# Altium footprint library JEDEC.PcbLib: 40 footprints (part 2 of 3)
Each footprint in its own frame and in the unit in brackets; x right, y up, seen from the top. Pads: shape width x height; smd on the part's side, far side on the other; paste and mask are expansions set on the pad; w line width, h text height; cw(c..) or ccw(c..) is an arc to the next point about the centre after c.
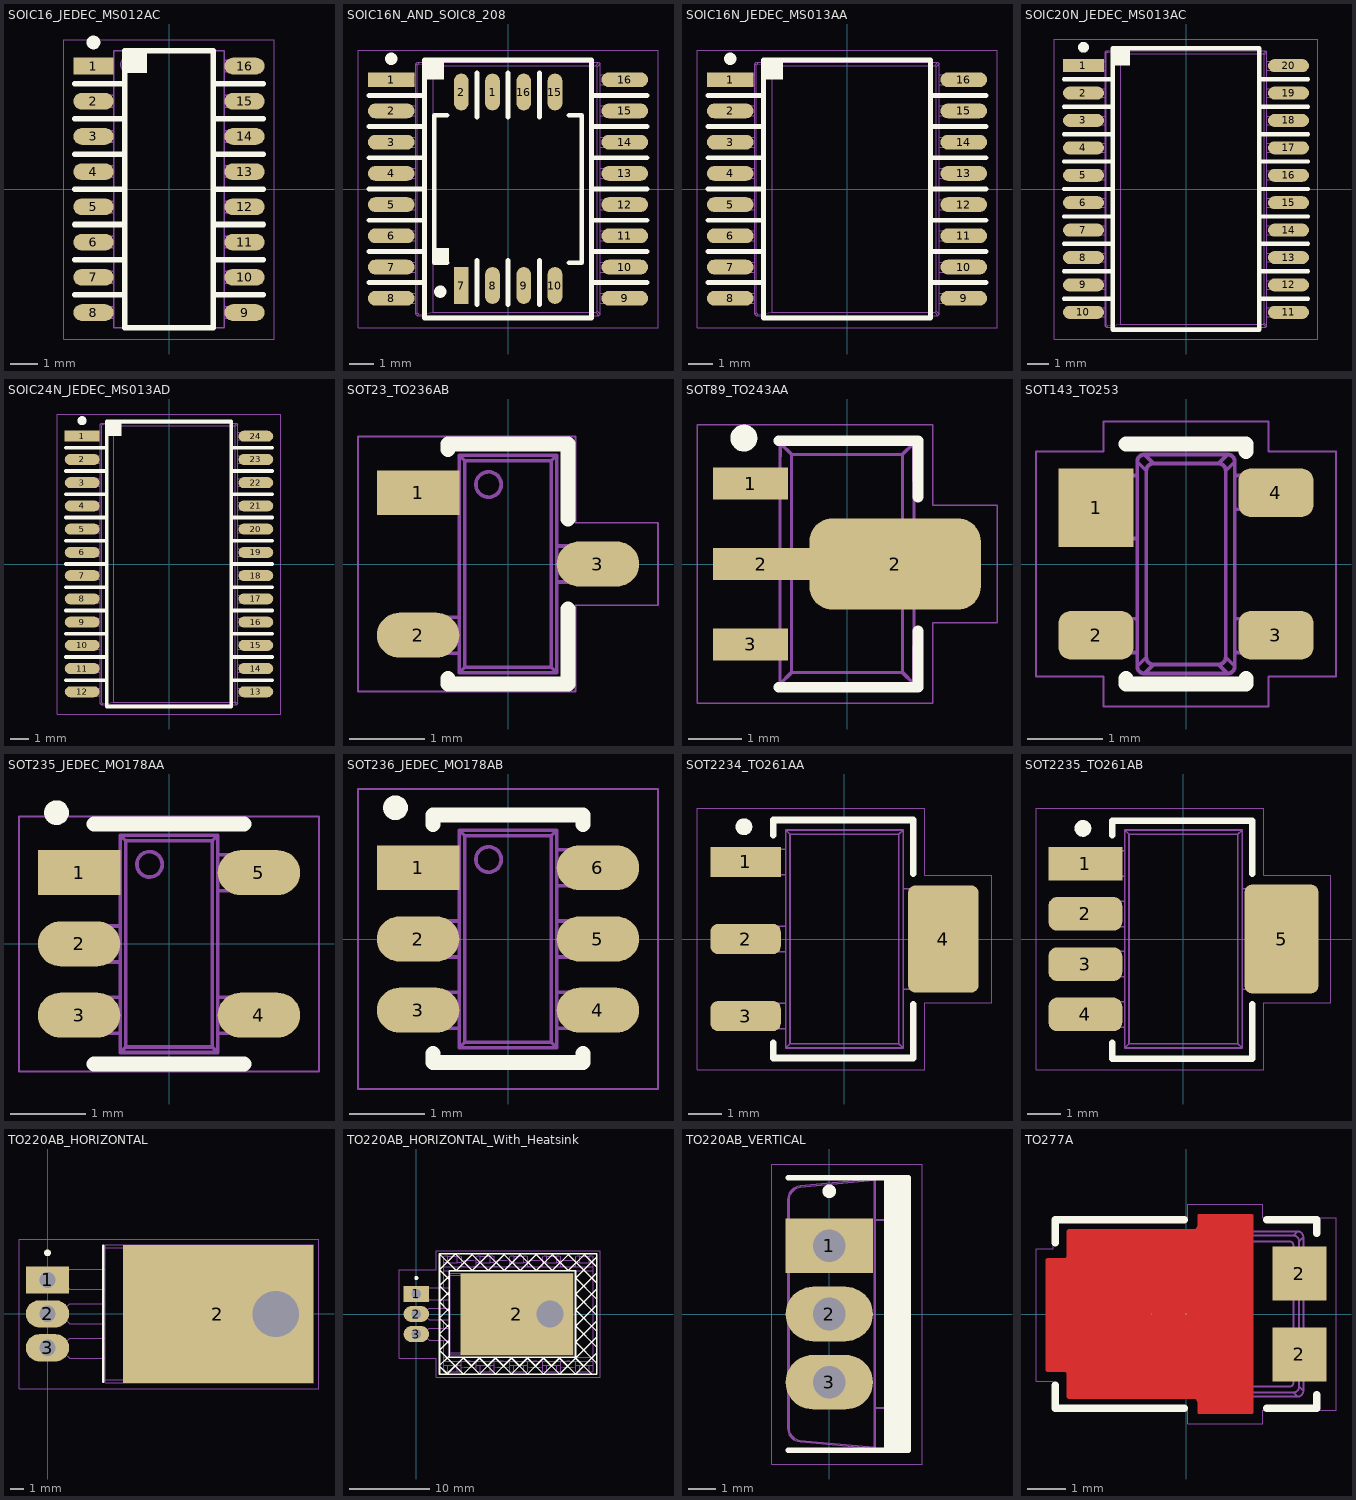
[diagram p1: the footprints below, top view; thin cyan lines are the x and y axes]

## SOIC16_JEDEC_MS012AC [mm] "SOIC, 16-Leads, Body 3.90x9.90mm, Pitch 1.27mm"
height 1.75
pads (16):
  rect 1.45x0.6 smd paste+0 mask+0.05: 1(-2.725,4.445)
  oval 1.45x0.6 smd paste+0 mask+0.05: 2(-2.725,3.175) 3(-2.725,1.905) 4(-2.725,0.635) 5(-2.725,-0.635) 6(-2.725,-1.905) 7(-2.725,-3.175) 8(-2.725,-4.445) 9(2.725,-4.445) 10(2.725,-3.175) 11(2.725,-1.905) 12(2.725,-0.635) 13(2.725,0.635) 14(2.725,1.905) 15(2.725,3.175) 16(2.725,4.445)
Top Overlay:
  circle w0.25: c-2.725,5.295 r0.125
  rectangle: -1.6,4.2 -0.8,5
  lines w0.2: -3.4,-3.81 -1.6,-3.81 ; -3.4,-2.54 -1.6,-2.54 ; -3.4,-1.27 -1.6,-1.27 ; -3.4,0 -1.6,0 ; -3.4,1.27 -1.6,1.27 ; -3.4,2.54 -1.6,2.54 ; -3.4,3.81 -1.6,3.81 ; 1.6,-3.81 3.4,-3.81 ; 1.6,-2.54 3.4,-2.54 ; 1.6,-1.27 3.4,-1.27 ; 1.6,0 3.4,0 ; 1.6,1.27 3.4,1.27 ; 1.6,2.54 3.4,2.54 ; 1.6,3.81 3.4,3.81 ; -1.6,-5 1.6,-5 1.6,5 -1.6,5 -1.6,-5
Top Courtyard:
  lines w0.025: -3.8,-5.4 3.8,-5.4 3.8,5.4 -3.8,5.4 -3.8,-5.4
Top Assembly:
  drawing of 213 lines, arcs and shapes, not listed
  text ".Designator" at 0.453,-4.511 h2
3D body "SOIC16_JEDEC_MS012.x_t": height 1.43, standoff 0, extent -3,-4.95 3,4.95

## SOIC16N_AND_SOIC8_208 [mm] "SOIC16 300mil, 16-Leads, Body 7.5x10.3mm"
height 2.05
pads (24):
  rect 1.9x0.6 smd paste+0 mask+0.05: 1(-4.75,4.445)
  oval 0.6x1.5 smd paste+0 mask+0.05: 1(-0.63,3.943) 2(-1.9,3.943) 8(-0.63,-3.925) 9(0.64,-3.925) 10(1.91,-3.925) 15(1.91,3.943) 16(0.64,3.943)
  oval 1.9x0.6 smd paste+0 mask+0.05: 2(-4.75,3.175) 3(-4.75,1.905) 4(-4.75,0.635) 5(-4.75,-0.635) 6(-4.75,-1.905) 7(-4.75,-3.175) 8(-4.75,-4.445) 9(4.75,-4.445) 10(4.75,-3.175) 11(4.75,-1.905) 12(4.75,-0.635) 13(4.75,0.635) 14(4.75,1.905) 15(4.75,3.175) 16(4.75,4.445)
  rect 0.6x1.5 smd paste+0 mask+0.05: 7(-1.9,-3.925)
Top Overlay:
  circle w0.25: c-2.755,-4.175 r0.125
  circle w0.25: c-4.75,5.295 r0.125
  region: -2.4,-3 -2.4,-2.4 -3,-2.4 -3,-3
  rectangle: -3.4,4.45 -2.6,5.25
  lines w0.2: -5.65,-3.81 -3.4,-3.81 ; -5.65,-2.54 -3.4,-2.54 ; -5.65,-1.27 -3.4,-1.27 ; -5.65,0 -3.4,0 ; -5.65,1.27 -3.4,1.27 ; -5.65,2.54 -3.4,2.54 ; -5.65,3.81 -3.4,3.81 ; -2.475,-3 -3,-3 -3,3 -2.475,3 ; -1.265,-4.7 -1.265,-2.9 ; -1.265,2.918 -1.265,4.718 ; 0.005,-4.7 0.005,-2.9 ; 0.005,2.918 0.005,4.718 ; 1.275,-4.7 1.275,-2.9 ; 1.275,2.918 1.275,4.718 ; 2.475,-3 3,-3 3,3 2.475,3 ; 3.4,-3.81 5.65,-3.81 ; 3.4,-2.54 5.65,-2.54 ; 3.4,-1.27 5.65,-1.27 ; 3.4,0 5.65,0 ; 3.4,1.27 5.65,1.27 ; 3.4,2.54 5.65,2.54 ; 3.4,3.81 5.65,3.81 ; -3.4,-5.25 -3.4,5.25 3.4,5.25 3.4,-5.25 -3.4,-5.25
Top Courtyard:
  lines w0.025: -6.1,-5.65 6.1,-5.65 6.1,5.65 -6.1,5.65 -6.1,-5.65
Top Assembly:
  drawing of 307 lines, arcs and shapes, not listed
  text ".Designator" at 0.679,-6.763 h3
3D body "SOIC16N_JEDEC_MS013AA.x_t": height 2.25, standoff 0, extent -5.15,-5.15 5.15,5.15

## SOIC16N_JEDEC_MS013AA [mm] "SOIC16 300mil, 16-Leads, Body 7.5x10.3mm"
height 2.05
pads (16):
  rect 1.9x0.6 smd paste+0 mask+0.05: 1(-4.75,4.445)
  oval 1.9x0.6 smd paste+0 mask+0.05: 2(-4.75,3.175) 3(-4.75,1.905) 4(-4.75,0.635) 5(-4.75,-0.635) 6(-4.75,-1.905) 7(-4.75,-3.175) 8(-4.75,-4.445) 9(4.75,-4.445) 10(4.75,-3.175) 11(4.75,-1.905) 12(4.75,-0.635) 13(4.75,0.635) 14(4.75,1.905) 15(4.75,3.175) 16(4.75,4.445)
Top Overlay:
  circle w0.25: c-4.75,5.295 r0.125
  rectangle: -3.4,4.45 -2.6,5.25
  lines w0.2: -5.65,-3.81 -3.4,-3.81 ; -5.65,-2.54 -3.4,-2.54 ; -5.65,-1.27 -3.4,-1.27 ; -5.65,0 -3.4,0 ; -5.65,1.27 -3.4,1.27 ; -5.65,2.54 -3.4,2.54 ; -5.65,3.81 -3.4,3.81 ; 3.4,-3.81 5.65,-3.81 ; 3.4,-2.54 5.65,-2.54 ; 3.4,-1.27 5.65,-1.27 ; 3.4,0 5.65,0 ; 3.4,1.27 5.65,1.27 ; 3.4,2.54 5.65,2.54 ; 3.4,3.81 5.65,3.81 ; -3.4,-5.25 -3.4,5.25 3.4,5.25 3.4,-5.25 -3.4,-5.25
Top Courtyard:
  lines w0.025: -6.1,-5.65 -6.1,5.65 6.1,5.65 6.1,-5.65 -6.1,-5.65
Top Assembly:
  drawing of 307 lines, arcs and shapes, not listed
  text ".Designator" at 0.679,-6.763 h3
3D body "SOIC16N_JEDEC_MS013AA.x_t": height 2.25, standoff 0, extent -5.15,-5.15 5.15,5.15

## SOIC20N_JEDEC_MS013AC [mm] "SOIC16 300mil, 16-Leads, Body 7.5x12.8mm"
height 2.05
pads (20):
  rect 1.9x0.6 smd paste+0 mask+0.05: 1(-4.75,5.715)
  oval 1.9x0.6 smd paste+0 mask+0.05: 2(-4.75,4.445) 3(-4.75,3.175) 4(-4.75,1.905) 5(-4.75,0.635) 6(-4.75,-0.635) 7(-4.75,-1.905) 8(-4.75,-3.175) 9(-4.75,-4.445) 10(-4.75,-5.715) 11(4.75,-5.715) 12(4.75,-4.445) 13(4.75,-3.175) 14(4.75,-1.905) 15(4.75,-0.635) 16(4.75,0.635) 17(4.75,1.905) 18(4.75,3.175) 19(4.75,4.445) 20(4.75,5.715)
Top Overlay:
  circle w0.25: c-4.75,6.565 r0.125
  rectangle: -3.4,5.72 -2.6,6.52
  lines w0.2: -5.65,-5.08 -3.4,-5.08 ; -5.65,-3.81 -3.4,-3.81 ; -5.65,-2.54 -3.4,-2.54 ; -5.65,-1.27 -3.4,-1.27 ; -5.65,0 -3.4,0 ; -5.65,1.27 -3.4,1.27 ; -5.65,2.54 -3.4,2.54 ; -5.65,3.81 -3.4,3.81 ; -5.65,5.08 -3.4,5.08 ; 3.4,-5.08 5.65,-5.08 ; 3.4,-3.81 5.65,-3.81 ; 3.4,-2.54 5.65,-2.54 ; 3.4,-1.27 5.65,-1.27 ; 3.4,0 5.65,0 ; 3.4,1.27 5.65,1.27 ; 3.4,2.54 5.65,2.54 ; 3.4,3.81 5.65,3.81 ; 3.4,5.08 5.65,5.08 ; -3.4,-6.52 3.4,-6.52 3.4,6.52 -3.4,6.52 -3.4,-6.52
Top Courtyard:
  lines w0.025: -6.1,-6.95 -6.1,6.95 6.1,6.95 6.1,-6.95 -6.1,-6.95
Top Assembly:
  drawing of 375 lines, arcs and shapes, not listed
  text ".Designator" at 0.679,-6.763 h3
3D body "SOIC20N_JEDEC_MS013AC.x_t": height 2.25, standoff 0, extent -5.15,-6.4 5.15,6.4

## SOIC24N_JEDEC_MS013AD [mm] "SOIC24 300mil, 24-Leads, Body 7.5x15.4mm"
height 2.05
pads (24):
  rect 1.9x0.6 smd paste+0 mask+0.05: 1(-4.75,6.985)
  oval 1.9x0.6 smd paste+0 mask+0.05: 2(-4.75,5.715) 3(-4.75,4.445) 4(-4.75,3.175) 5(-4.75,1.905) 6(-4.75,0.635) 7(-4.75,-0.635) 8(-4.75,-1.905) 9(-4.75,-3.175) 10(-4.75,-4.445) 11(-4.75,-5.715) 12(-4.75,-6.985) 13(4.75,-6.985) 14(4.75,-5.715) 15(4.75,-4.445) 16(4.75,-3.175) 17(4.75,-1.905) 18(4.75,-0.635) 19(4.75,0.635) 20(4.75,1.905) 21(4.75,3.175) 22(4.75,4.445) 23(4.75,5.715) 24(4.75,6.985)
Top Overlay:
  circle w0.25: c-4.75,7.835 r0.125
  rectangle: -3.4,6.99 -2.6,7.79
  lines w0.2: -5.65,-6.35 -3.4,-6.35 ; -5.65,-5.08 -3.4,-5.08 ; -5.65,-3.81 -3.4,-3.81 ; -5.65,-2.54 -3.4,-2.54 ; -5.65,-1.27 -3.4,-1.27 ; -5.65,0 -3.4,0 ; -5.65,1.27 -3.4,1.27 ; -5.65,2.54 -3.4,2.54 ; -5.65,3.81 -3.4,3.81 ; -5.65,5.08 -3.4,5.08 ; -5.65,6.35 -3.4,6.35 ; 3.4,-6.35 5.65,-6.35 ; 3.4,-5.08 5.65,-5.08 ; 3.4,-3.81 5.65,-3.81 ; 3.4,-2.54 5.65,-2.54 ; 3.4,-1.27 5.65,-1.27 ; 3.4,0 5.65,0 ; 3.4,1.27 5.65,1.27 ; 3.4,2.54 5.65,2.54 ; 3.4,3.81 5.65,3.81 ; 3.4,5.08 5.65,5.08 ; 3.4,6.35 5.65,6.35 ; -3.4,-7.79 3.4,-7.79 3.4,7.79 -3.4,7.79 -3.4,-7.79
Top Courtyard:
  lines w0.025: -6.1,-8.2 -6.1,8.2 6.1,8.2 6.1,-8.2 -6.1,-8.2
Top Assembly:
  drawing of 443 lines, arcs and shapes, not listed
  text ".Designator" at 0.679,-6.763 h3
3D body "SOIC24N_JEDEC_MS013AD.x_t": height 2.25, standoff 0, extent -5.15,-7.7 5.15,7.7

## SOT23_TO236AB [mm] "TO236AB (SOT23-3), 3-Leads, Body 1.30x2.90mm, Pitch 0.95mm"
height 0.95
pads (3):
  rect 1.1x0.6 smd paste+0 mask+0.05: 1(-1.2,0.95)
  oval 1.1x0.6 smd paste+0 mask+0.05: 2(-1.2,-0.95) 3(1.2,0)
Top Overlay:
  lines w0.2: -0.8,-1.525 -0.8,-1.6 0.8,-1.6 0.8,-0.6 ; -0.8,1.525 -0.8,1.6 0.8,1.6 0.8,0.6
Top Courtyard:
  lines w0.025: -2,-1.7 0.9,-1.7 0.9,-0.55 2,-0.55 2,0.55 0.9,0.55 0.9,1.7 -2,1.7 -2,-1.7
Top Assembly:
  circle w0.05: c-0.26,1.06 r0.169
  lines w0.05: -1.19,-1.19 -1.099,-1.19 ; -1.19,-1.19 -1.4,-1.19 -1.4,-0.71 -1.19,-0.71 ; -1.19,-1.19 -1.19,-0.71 ; -1.19,-0.71 -1.099,-0.71 ; -1.19,0.71 -1.099,0.71 ; -1.19,0.71 -1.4,0.71 -1.4,1.19 -1.19,1.19 ; -1.19,0.71 -1.19,1.19 ; -1.19,1.19 -1.099,1.19 ; -1.099,-1.19 -1.074,-1.19 ; -1.099,-1.19 -1.099,-0.71 ; -1.099,-0.71 -1.074,-0.71 ; -1.099,0.71 -1.074,0.71 ; -1.099,0.71 -1.099,1.19 ; -1.099,1.19 -1.074,1.19 ; -1.074,-1.19 -0.825,-1.19 ; -1.074,-1.19 -1.074,-0.71 ; -1.074,-0.71 -0.825,-0.71 ; -1.074,0.71 -0.825,0.71 ; -1.074,0.71 -1.074,1.19 ; -1.074,1.19 -0.825,1.19 ; -0.825,-1.19 -0.65,-1.19 ; -0.825,-1.19 -0.825,-0.71 ; -0.825,-0.71 -0.65,-0.71 ; -0.825,0.71 -0.65,0.71 ; -0.825,0.71 -0.825,1.19 ; -0.825,1.19 -0.65,1.19 ; -0.65,-1.45 -0.576,-1.376 ; -0.65,-1.45 -0.65,-1.19 ; -0.65,-1.45 0.65,-1.45 ; -0.65,-1.19 -0.65,-0.71 ; -0.65,-0.71 -0.65,0.71 ; -0.65,0.71 -0.65,1.19 ; -0.65,1.19 -0.65,1.45 ; -0.65,1.45 0.65,1.45 ; -0.65,1.45 -0.576,1.376 ; -0.576,-1.376 -0.576,1.376 ; -0.576,-1.376 0.576,-1.376 ; -0.576,1.376 0.576,1.376 ; 0.576,-1.376 0.576,1.376 ; 0.576,-1.376 0.65,-1.45 ; 0.576,1.376 0.65,1.45 ; 0.65,-1.45 0.65,-0.24 ; 0.65,-0.24 0.65,0.24 ; 0.65,-0.24 0.825,-0.24 ; 0.65,0.24 0.65,1.45 ; 0.65,0.24 0.825,0.24 ; 0.825,-0.24 1.074,-0.24 ; 0.825,-0.24 0.825,0.24 ; 0.825,0.24 1.074,0.24 ; 1.074,-0.24 1.099,-0.24 ; 1.074,-0.24 1.074,0.24 ; 1.074,0.24 1.099,0.24 ; 1.099,-0.24 1.19,-0.24 ; 1.099,-0.24 1.099,0.24 ; 1.099,0.24 1.19,0.24 ; 1.19,-0.24 1.4,-0.24 1.4,0.24 1.19,0.24 ; 1.19,-0.24 1.19,0.24
  text ".Designator" at 0.226,-2.252 h1
3D body "SOT23_TO236AB.x_t": height 1.05, standoff 0, extent -1.32,-1.45 1.4,1.45

## SOT89_TO243AA [mm] "SOT89, 3-Leads, Body 4.50x2.45mm, Pitch 1.50mm, Lead Span 4.25mm"
height 1.5
pads (4):
  rect 1.4x0.6 smd paste+0 mask+0.05: 1(-1.8,1.5) 3(-1.8,-1.5)
  rect 1.8x0.6 smd paste+0 mask+0.05: 2(-1.6,0)
  rrect50% 3.2x1.7 smd paste-10 mask+0.05: 2(0.9,0)
Top Overlay:
  circle w0.25: c-1.925,2.35 r0.125
  lines w0.2: -1.275,-2.3 1.325,-2.3 1.325,-1.25 ; -1.275,2.3 1.325,2.3 1.325,1.25
Top Paste:
  rectangle: 1.4,0.1 2,0.7
  region: 2,-0.1 1.4,-0.1 1.4,-0.7 2,-0.7
  rectangle: 0.6,0.1 1.2,0.7
  region: 1.2,-0.1 0.6,-0.1 0.6,-0.7 1.2,-0.7
  rectangle: -0.2,0.1 0.4,0.7
  region: 0.4,-0.1 -0.2,-0.1 -0.2,-0.7 0.4,-0.7
Top Courtyard:
  lines w0.025: -2.8,-2.6 -1.1,-2.6 1.6,-2.6 1.6,-1.1 2.8,-1.1 2.8,1.1 1.6,1.1 1.6,2.6 -1.1,2.6 -2.8,2.6 -2.8,-2.6
Top Assembly:
  drawing of 476 lines, arcs and shapes, not listed
  text ".Designator" at 0.339,-3.378 h1.5
3D body "SOT89_TO243AA.x_t": height 1.6, standoff 0, extent -2.272,-2.25 1.973,2.25

## SOT143_TO253 [mm] "TO253 (SOT143), 4-Leads, Body 1.30x2.90mm, Pitch 1.92mm"
height 0.9
pads (4):
  rect 1x1.05 smd paste+0 mask+0.05: 1(-1.2,0.75)
  rrect50% 1x0.65 smd paste+0 mask+0.05: 2(-1.2,-0.95) 3(1.2,-0.95) 4(1.2,0.95)
Top Overlay:
  lines w0.2: -0.8,-1.525 -0.8,-1.6 0.8,-1.6 0.8,-1.525 ; -0.8,1.6 0.8,1.6 0.8,1.5
Top Courtyard:
  lines w0.025: -2,-1.5 -1.1,-1.5 -1.1,-1.9 1.1,-1.9 1.1,-1.5 2,-1.5 2,1.5 1.1,1.5 1.1,1.9 -1.1,1.9 -1.1,1.5 -2,1.5 -2,-1.5
Top Assembly:
  drawing of 864 lines, arcs and shapes, not listed
  text ".Designator" at 0.226,-2.252 h1
3D body "SOT143_TO253.x_t": height 1, standoff 0, extent -1.185,-1.45 1.185,1.45

## SOT235_JEDEC_MO178AA [mm] "SOT23, 5-Leads, Body 1.60x2.90mm, Pitch 0.95mm"
height 1.15
pads (5):
  rect 1.1x0.6 smd paste+0 mask+0.05: 1(-1.2,0.95)
  oval 1.1x0.6 smd paste+0 mask+0.05: 2(-1.2,0) 3(-1.2,-0.95) 4(1.2,-0.95) 5(1.2,0.95)
Top Overlay:
  circle w0.17: c-1.5,1.75 r0.08
  lines w0.2: -1,-1.6 1,-1.6 ; -1,1.6 1,1.6
Top Courtyard:
  lines w0.025: -2,-1.7 -2,1.7 2,1.7 2,-1.7 -2,-1.7
Top Assembly:
  circle w0.05: c-0.26,1.06 r0.169
  lines w0.05: -0.65,-0.24 -0.825,-0.24 ; -0.65,0.24 -0.825,0.24 ; 0.65,-1.19 0.825,-1.19 ; 0.65,-0.71 0.825,-0.71 ; 0.65,0.71 0.825,0.71 ; 0.65,1.19 0.825,1.19 ; -1.19,-1.19 -1.099,-1.19 ; -1.19,-1.19 -1.4,-1.19 -1.4,-0.71 -1.19,-0.71 ; -1.19,-1.19 -1.19,-0.71 ; -1.19,-0.71 -1.099,-0.71 ; -1.19,-0.24 -1.19,0.24 ; -1.19,-0.24 -1.4,-0.24 -1.4,0.24 -1.19,0.24 ; -1.19,-0.24 -1.099,-0.24 ; -1.19,0.24 -1.099,0.24 ; -1.19,0.71 -1.099,0.71 ; -1.19,0.71 -1.4,0.71 -1.4,1.19 -1.19,1.19 ; -1.19,0.71 -1.19,1.19 ; -1.19,1.19 -1.099,1.19 ; -1.099,-1.19 -1.074,-1.19 ; -1.099,-1.19 -1.099,-0.71 ; -1.099,-0.71 -1.074,-0.71 ; -1.099,-0.24 -1.099,0.24 ; -1.099,-0.24 -1.074,-0.24 ; -1.099,0.24 -1.074,0.24 ; -1.099,0.71 -1.074,0.71 ; -1.099,0.71 -1.099,1.19 ; -1.099,1.19 -1.074,1.19 ; -1.074,-1.19 -0.825,-1.19 ; -1.074,-1.19 -1.074,-0.71 ; -1.074,-0.71 -0.825,-0.71 ; -1.074,-0.24 -1.074,0.24 ; -1.074,-0.24 -0.825,-0.24 ; -1.074,0.24 -0.825,0.24 ; -1.074,0.71 -0.825,0.71 ; -1.074,0.71 -1.074,1.19 ; -1.074,1.19 -0.825,1.19 ; -0.825,-1.19 -0.65,-1.19 ; -0.825,-1.19 -0.825,-0.71 ; -0.825,-0.71 -0.65,-0.71 ; -0.825,-0.24 -0.825,0.24 ; -0.825,0.71 -0.65,0.71 ; -0.825,0.71 -0.825,1.19 ; -0.825,1.19 -0.65,1.19 ; -0.65,-1.45 -0.576,-1.376 ; -0.65,-1.45 -0.65,-1.19 ; -0.65,-1.45 0.65,-1.45 ; -0.65,-1.19 -0.65,-0.71 ; -0.65,-0.71 -0.65,0.71 ; -0.65,0.71 -0.65,1.19 ; -0.65,1.19 -0.65,1.45 ; -0.65,1.45 0.65,1.45 ; -0.65,1.45 -0.576,1.376 ; -0.576,-1.376 -0.576,1.376 ; -0.576,-1.376 0.576,-1.376 ; -0.576,1.376 0.576,1.376 ; 0.576,-1.376 0.576,1.376 ; 0.576,-1.376 0.65,-1.45 ; 0.576,1.376 0.65,1.45 ; 0.65,-1.45 0.65,-0.24 0.65,0.24 0.65,1.45 ; 0.825,-1.19 0.825,-0.71 ; 0.825,-1.19 1.074,-1.19 ; 0.825,-0.71 1.074,-0.71 ; 0.825,0.71 0.825,1.19 ; 0.825,0.71 1.074,0.71 ; 0.825,1.19 1.074,1.19 ; 1.074,-1.19 1.074,-0.71 ; 1.074,-1.19 1.099,-1.19 ; 1.074,-0.71 1.099,-0.71 ; 1.074,0.71 1.074,1.19 ; 1.074,0.71 1.099,0.71 ; 1.074,1.19 1.099,1.19 ; 1.099,-1.19 1.099,-0.71 ; 1.099,-1.19 1.19,-1.19 ; 1.099,-0.71 1.19,-0.71 ; 1.099,0.71 1.099,1.19 ; 1.099,0.71 1.19,0.71 ; 1.099,1.19 1.19,1.19 ; 1.19,-1.19 1.19,-0.71 ; 1.19,-1.19 1.4,-1.19 1.4,-0.71 1.19,-0.71 ; 1.19,0.71 1.19,1.19 ; 1.19,0.71 1.4,0.71 1.4,1.19 1.19,1.19
  text ".Designator" at 0.226,-2.252 h1
3D body "SOT235_JEDEC_MO178.x_t": height 1.2, standoff 0, extent -1.4,-1.45 1.4,1.45

## SOT236_JEDEC_MO178AB [mm] "SOT23, 6-Leads, Body 1.60x2.90mm, Pitch 0.95mm"
height 1.15
pads (6):
  rect 1.1x0.6 smd paste+0 mask+0.05: 1(-1.2,0.95)
  oval 1.1x0.6 smd paste+0 mask+0.05: 2(-1.2,0) 3(-1.2,-0.95) 4(1.2,-0.95) 5(1.2,0) 6(1.2,0.95)
Top Overlay:
  circle w0.17: c-1.5,1.75 r0.08
  lines w0.2: -1,-1.525 -1,-1.65 1,-1.65 1,-1.525 ; -1,1.525 -1,1.65 1,1.65 1,1.525
Top Courtyard:
  lines w0.025: -2,-2 -2,2 2,2 2,-2 -2,-2
Top Assembly:
  circle w0.05: c-0.26,1.06 r0.169
  lines w0.05: -0.65,-0.24 -0.825,-0.24 ; -0.65,0.24 -0.825,0.24 ; 0.65,-1.19 0.825,-1.19 ; 0.65,-0.71 0.825,-0.71 ; 0.65,0.71 0.825,0.71 ; 0.65,1.19 0.825,1.19 ; -1.19,-1.19 -1.099,-1.19 ; -1.19,-1.19 -1.4,-1.19 -1.4,-0.71 -1.19,-0.71 ; -1.19,-1.19 -1.19,-0.71 ; -1.19,-0.71 -1.099,-0.71 ; -1.19,-0.24 -1.19,0.24 ; -1.19,-0.24 -1.4,-0.24 -1.4,0.24 -1.19,0.24 ; -1.19,-0.24 -1.099,-0.24 ; -1.19,0.24 -1.099,0.24 ; -1.19,0.71 -1.099,0.71 ; -1.19,0.71 -1.4,0.71 -1.4,1.19 -1.19,1.19 ; -1.19,0.71 -1.19,1.19 ; -1.19,1.19 -1.099,1.19 ; -1.099,-1.19 -1.074,-1.19 ; -1.099,-1.19 -1.099,-0.71 ; -1.099,-0.71 -1.074,-0.71 ; -1.099,-0.24 -1.099,0.24 ; -1.099,-0.24 -1.074,-0.24 ; -1.099,0.24 -1.074,0.24 ; -1.099,0.71 -1.074,0.71 ; -1.099,0.71 -1.099,1.19 ; -1.099,1.19 -1.074,1.19 ; -1.074,-1.19 -0.825,-1.19 ; -1.074,-1.19 -1.074,-0.71 ; -1.074,-0.71 -0.825,-0.71 ; -1.074,-0.24 -1.074,0.24 ; -1.074,-0.24 -0.825,-0.24 ; -1.074,0.24 -0.825,0.24 ; -1.074,0.71 -0.825,0.71 ; -1.074,0.71 -1.074,1.19 ; -1.074,1.19 -0.825,1.19 ; -0.825,-1.19 -0.65,-1.19 ; -0.825,-1.19 -0.825,-0.71 ; -0.825,-0.71 -0.65,-0.71 ; -0.825,-0.24 -0.825,0.24 ; -0.825,0.71 -0.65,0.71 ; -0.825,0.71 -0.825,1.19 ; -0.825,1.19 -0.65,1.19 ; -0.65,-1.45 -0.576,-1.376 ; -0.65,-1.45 -0.65,-1.19 ; -0.65,-1.45 0.65,-1.45 ; -0.65,-1.19 -0.65,-0.71 ; -0.65,-0.71 -0.65,0.71 ; -0.65,0.71 -0.65,1.19 ; -0.65,1.19 -0.65,1.45 ; -0.65,1.45 0.65,1.45 ; -0.65,1.45 -0.576,1.376 ; -0.576,-1.376 -0.576,1.376 ; -0.576,-1.376 0.576,-1.376 ; -0.576,1.376 0.576,1.376 ; 0.576,-1.376 0.576,1.376 ; 0.576,-1.376 0.65,-1.45 ; 0.576,1.376 0.65,1.45 ; 0.65,-1.45 0.65,-0.24 ; 0.65,-0.24 0.65,0.24 ; 0.65,-0.24 0.825,-0.24 ; 0.65,0.24 0.65,1.45 ; 0.65,0.24 0.825,0.24 ; 0.825,-1.19 0.825,-0.71 ; 0.825,-1.19 1.074,-1.19 ; 0.825,-0.71 1.074,-0.71 ; 0.825,-0.24 1.074,-0.24 ; 0.825,-0.24 0.825,0.24 ; 0.825,0.24 1.074,0.24 ; 0.825,0.71 0.825,1.19 ; 0.825,0.71 1.074,0.71 ; 0.825,1.19 1.074,1.19 ; 1.074,-1.19 1.074,-0.71 ; 1.074,-1.19 1.099,-1.19 ; 1.074,-0.71 1.099,-0.71 ; 1.074,-0.24 1.099,-0.24 ; 1.074,-0.24 1.074,0.24 ; 1.074,0.24 1.099,0.24 ; 1.074,0.71 1.074,1.19 ; 1.074,0.71 1.099,0.71 ; 1.074,1.19 1.099,1.19 ; 1.099,-1.19 1.099,-0.71 ; 1.099,-1.19 1.19,-1.19 ; 1.099,-0.71 1.19,-0.71 ; 1.099,-0.24 1.19,-0.24 ; 1.099,-0.24 1.099,0.24 ; 1.099,0.24 1.19,0.24 ; 1.099,0.71 1.099,1.19 ; 1.099,0.71 1.19,0.71 ; 1.099,1.19 1.19,1.19 ; 1.19,-1.19 1.19,-0.71 ; 1.19,-1.19 1.4,-1.19 1.4,-0.71 1.19,-0.71 ; 1.19,-0.24 1.4,-0.24 1.4,0.24 1.19,0.24 ; 1.19,-0.24 1.19,0.24 ; 1.19,0.71 1.19,1.19 ; 1.19,0.71 1.4,0.71 1.4,1.19 1.19,1.19
  text ".Designator" at 0.226,-2.252 h1
3D body "SOT236_JEDEC_MO178.x_t": height 1.2, standoff 0, extent -1.375,-1.45 1.425,1.45

## SOT2234_TO261AA [mm] "SOT223, 4-Leads, Body 6.50x7.00mm (avg), Pitch 2.30mm"
height 1.8
pads (4):
  rect 2.1x0.9 smd paste+0 mask+0.05: 1(-2.95,2.3)
  rrect50% 2.1x0.9 smd paste+0 mask+0.05: 2(-2.95,0) 3(-2.95,-2.3)
  rrect20% 2.1x3.2 smd paste-50 mask+0.05: 4(2.95,0)
Top Overlay:
  circle w0.25: c-3,3.35 r0.125
  lines w0.2: -2.125,-3.1 -2.125,-3.55 ; -2.125,3.1 -2.125,3.55 ; 2.05,-1.95 2.05,-3.55 -2.125,-3.55 ; 2.05,1.95 2.05,3.55 -2.125,3.55 ; -2.125,-3.55 -2.125,-3.55 ; -2.125,3.55 -2.125,3.55
Top Paste:
  rectangle: 2.25,0.9 2.85,1.5
  rectangle: 3.05,0.9 3.65,1.5
  rectangle: 2.25,0.1 2.85,0.7
  rectangle: 3.05,0.1 3.65,0.7
  rectangle: 2.25,-0.7 2.85,-0.1
  rectangle: 3.05,-0.7 3.65,-0.1
  region: 3.65,-1.5 3.65,-0.9 3.05,-0.9 3.05,-1.5
  region: 2.85,-1.5 2.85,-0.9 2.25,-0.9 2.25,-1.5
Top Courtyard:
  lines w0.025: -4.4,-3.9 -4.4,3.9 2.4,3.9 2.4,1.9 4.4,1.9 4.4,-1.9 2.4,-1.9 2.4,-3.9 -4.4,-3.9
Top Assembly:
  lines w0.05: -2.894,-2.681 -2.894,-1.919 ; -2.894,-0.381 -2.894,0.381 ; -2.894,1.919 -2.894,2.681 ; -2.725,-2.681 -2.725,-1.919 ; -2.725,-0.381 -2.725,0.381 ; -2.725,1.919 -2.725,2.681 ; -2.535,-2.681 -2.535,-1.919 ; -2.535,-0.381 -2.535,0.381 ; -2.535,1.919 -2.535,2.681 ; -2.167,-2.681 -2.167,-1.919 ; -2.167,-0.381 -2.167,0.381 ; -2.167,1.919 -2.167,2.681 ; -1.75,-2.681 -3.5,-2.681 -3.5,-1.919 -1.75,-1.919 ; -1.75,-0.381 -3.5,-0.381 -3.5,0.381 -1.75,0.381 ; -1.75,1.919 -3.5,1.919 -3.5,2.681 -1.75,2.681 ; 1.75,-1.5 3.5,-1.5 3.5,1.5 1.75,1.5 ; 2.167,-1.5 2.167,1.5 ; 2.535,-1.5 2.535,1.5 ; 2.725,-1.5 2.725,1.5 ; 2.894,-1.5 2.894,1.5 ; -1.75,-3.25 -1.75,3.25 ; -1.75,-3.25 -1.624,-3.124 ; -1.75,-3.25 1.75,-3.25 ; -1.75,3.25 1.75,3.25 ; -1.75,3.25 -1.624,3.124 ; -1.624,-3.124 -1.624,3.124 ; -1.624,-3.124 1.624,-3.124 ; -1.624,3.124 1.624,3.124 ; 1.624,-3.124 1.75,-3.25 ; 1.624,-3.124 1.624,3.124 ; 1.624,3.124 1.75,3.25 ; 1.75,-3.25 1.75,3.25
  text ".Designator" at 0.453,-4.511 h2
3D body "SOT223_TO261AA.x_t": height 1.8, standoff 0, extent -3.5,-3.25 3.5,3.25

## SOT2235_TO261AB [mm] "SOT223, 5-Leads, Body 6.50x7.00mm (avg), Pitch 1.50mm"
height 1.8
pads (5):
  rect 2.2x1 smd paste+0 mask+0.05: 1(-2.925,2.25)
  rrect50% 2.2x1 smd paste+0 mask+0.05: 2(-2.925,0.75) 3(-2.925,-0.75) 4(-2.925,-2.25)
  rrect20% 2.2x3.25 smd paste-50 mask+0.05: 5(2.925,0)
Top Overlay:
  circle w0.25: c-3,3.3 r0.125
  lines w0.2: -2.125,-3.575 2.05,-3.575 ; -2.125,-3.525 -2.125,-3.1 ; -2.125,3.1 -2.125,3.525 2.05,3.525 2.05,1.95 ; 2.05,-3.525 2.05,-1.95
Top Paste:
  rectangle: 2.25,0.9 2.85,1.5
  rectangle: 3.05,0.9 3.65,1.5
  rectangle: 2.25,0.1 2.85,0.7
  rectangle: 3.05,0.1 3.65,0.7
  rectangle: 2.25,-0.7 2.85,-0.1
  rectangle: 3.05,-0.7 3.65,-0.1
  region: 3.65,-1.5 3.65,-0.9 3.05,-0.9 3.05,-1.5
  region: 2.85,-1.5 2.85,-0.9 2.25,-0.9 2.25,-1.5
Top Courtyard:
  lines w0.025: -4.4,-3.9 -4.4,3.9 2.4,3.9 2.4,1.9 4.4,1.9 4.4,-1.9 2.4,-1.9 2.4,-3.9 -4.4,-3.9
Top Assembly:
  lines w0.05: -2.894,-2.631 -2.894,-1.869 ; -2.894,-1.131 -2.894,-0.369 ; -2.894,0.369 -2.894,1.131 ; -2.894,1.869 -2.894,2.631 ; -2.725,-2.631 -2.725,-1.869 ; -2.725,-1.131 -2.725,-0.369 ; -2.725,0.369 -2.725,1.131 ; -2.725,1.869 -2.725,2.631 ; -2.535,-2.631 -2.535,-1.869 ; -2.535,-1.131 -2.535,-0.369 ; -2.535,0.369 -2.535,1.131 ; -2.535,1.869 -2.535,2.631 ; -2.167,-2.631 -2.167,-1.869 ; -2.167,-1.131 -2.167,-0.369 ; -2.167,0.369 -2.167,1.131 ; -2.167,1.869 -2.167,2.631 ; -1.75,-2.631 -3.5,-2.631 -3.5,-1.869 -1.75,-1.869 ; -1.75,-1.131 -3.5,-1.131 -3.5,-0.369 -1.75,-0.369 ; -1.75,0.369 -3.5,0.369 -3.5,1.131 -1.75,1.131 ; -1.75,1.869 -3.5,1.869 -3.5,2.631 -1.75,2.631 ; 1.75,-1.5 3.5,-1.5 3.5,1.5 1.75,1.5 ; 2.167,-1.5 2.167,1.5 ; 2.535,-1.5 2.535,1.5 ; 2.725,-1.5 2.725,1.5 ; 2.894,-1.5 2.894,1.5 ; -1.75,-3.25 1.75,-3.25 ; -1.75,-3.25 -1.624,-3.124 ; -1.75,-3.25 -1.75,3.25 ; -1.75,3.25 -1.624,3.124 ; -1.75,3.25 1.75,3.25 ; -1.624,-3.124 1.624,-3.124 ; -1.624,-3.124 -1.624,3.124 ; -1.624,3.124 1.624,3.124 ; 1.624,-3.124 1.75,-3.25 ; 1.624,-3.124 1.624,3.124 ; 1.624,3.124 1.75,3.25 ; 1.75,-3.25 1.75,3.25
  text ".Designator" at 0.453,-4.511 h2
3D body "SOT223_TO261AB.x_t": height 1.8, standoff 0, extent -3.5,-3.25 3.5,3.25

## TO220AB_HORIZONTAL [mm] "TO220AB, 3-Leads, Horizontal Mounting"
height 4.57
pads (5):
  rect 3.2x2 hole 1.2: 1(0,2.5)
  oval 3.2x2 hole 1.2: 2(0,0) 3(0,-2.5)
  rect 14x10.16 smd paste-10 mask-8: 2(12.548,-0.01)
  round 0 hole 3.4 unplated: 2(16.814,0)
Top Overlay:
  circle w0.25: c0,4.5 r0.125
  lines w0.2: 4.1,-5 4.1,5
Top Courtyard:
  lines w0.025: -2.1,-5.5 -2.1,5.5 20,5.5 20,-5.5 -2.1,-5.5
Top Assembly:
  circle w0.05: c16.814,0 r1.778
  lines w0.05: 0.991,-2.889 0.991,-2.191 ; 0.991,-0.349 0.991,0.349 ; 0.991,2.191 0.991,2.889 ; 4.241,-4.854 12.905,-4.854 ; 4.241,-3.27 1.622,-3.27 1.241,-2.889 0,-2.889 0,-2.191 1.241,-2.191 1.622,-1.81 4.241,-1.81 ; 4.241,-0.73 1.622,-0.73 1.241,-0.349 0,-0.349 0,0.349 1.241,0.349 1.622,0.73 4.241,0.73 ; 4.241,1.81 1.622,1.81 1.241,2.191 0,2.191 0,2.889 1.241,2.889 1.622,3.27 4.241,3.27 ; 4.241,4.854 12.905,4.854 ; 13.131,-5.083 19.608,-5.083 19.608,5.083 13.131,5.083 ; 13.131,-5.08 4.241,-5.08 4.241,5.08 13.131,5.08
  text ".Designator" at 2.237,-0.679 h3
3D body "TO-220AB(Horizontal_Without_Gap).x_t": height 4.18, standoff -3.01, extent -0.241,-5.083 19.367,5.083

## TO220AB_HORIZONTAL_With_Heatsink [mm] "TO220AB, 3-Leads, Horizontal Mounting, 1.4mm Gap for Heat Sink RUCHI 718"
height 5.97
pads (5):
  rect 3.2x2 hole 1.2: 1(0,2.5)
  oval 3.2x2 hole 1.2: 2(0,0) 3(0,-2.5)
  rect 14x10.16 smd paste-10 mask-8: 2(12.548,-0.01)
  round 0 hole 3.4 unplated: 2(16.7,0)
Top Overlay:
  circle w0.25: c0,4.5 r0.125
  lines w0.2: 2.9,-6.435 4.102,-5.233 ; 2.905,-6.52 3.86,-7.475 5.946,-5.389 ; 4.088,4.347 2.9,5.535 4.859,7.494 ; 4.09,0.325 2.902,1.513 4.09,2.701 ; 4.089,2.336 2.901,3.524 4.089,4.712 ; 4.091,-1.686 2.903,-0.498 4.091,0.69 ; 4.092,-3.697 2.904,-2.509 4.092,-1.321 ; 4.093,-3.332 2.905,-4.52 5.875,-7.49 ; 4.9,7.5 6.979,5.421 9.058,7.5 ; 5.8,-5.405 7.886,-7.491 9.972,-5.405 ; 5.886,-7.491 7.972,-5.405 ; 6.9,7.5 8.979,5.421 11.058,7.5 ; 7.058,7.5 4.979,5.421 2.9,7.5 ; 7.8,-5.405 9.886,-7.491 11.972,-5.405 ; 8.9,7.5 10.979,5.421 13.058,7.5 ; 9.8,-5.405 11.886,-7.491 13.972,-5.405 ; 10.9,7.5 12.979,5.421 15.058,7.5 ; 11.8,-5.405 13.886,-7.491 15.972,-5.405 ; 12.9,7.5 14.979,5.421 17.058,7.5 ; 13.8,-5.405 15.886,-7.491 17.972,-5.405 ; 14.9,7.5 16.979,5.421 19.058,7.5 ; 15.8,-5.405 17.886,-7.491 ; 16.9,7.5 18.979,5.421 21.058,7.5 ; 17.8,-5.405 19.886,-7.491 ; 17.91,-7.495 22.507,-2.899 ; 18.9,7.5 22.506,3.894 ; 19.8,-5.405 21.886,-7.491 ; 19.884,-5.4 4.1,-5.4 4.1,5.4 19.884,5.4 ; 19.884,-5.395 19.884,5.405 ; 19.9,-7.505 22.51,-4.896 ; 20.9,7.5 22.526,5.874 ; 22.51,-6.115 19.9,-3.505 22.51,-0.896 ; 22.51,-4.115 19.9,-1.505 22.51,1.104 ; 22.51,-2.115 19.9,0.495 22.51,3.104 ; 22.51,-0.115 19.9,2.495 22.51,5.104 ; 22.51,1.885 19.9,4.495 22.51,7.104 ; 2.9,7.5 2.9,-7.5 22.534,-7.5 22.534,7.5 2.9,7.5
Top Courtyard:
  lines w0.025: -2.1,-5.5 -2.1,5.5 2.5,5.5 2.5,7.9 23,7.9 23,-7.9 2.5,-7.9 2.5,-5.5 -2.1,-5.5
Top Assembly:
  drawing of 160 lines, arcs and shapes, not listed
  text ".Designator" at 2.237,-0.679 h3
3D body "TO-220AB(Horizontal).x_t": height 5.58, standoff -3.01, extent -0.241,-5.083 19.367,5.083
3D body "718.x_t": height 9.9, standoff 0.3, extent 3.2,-7.2 21.9,7.2

## TO220AB_VERTICAL [mm] "TO220AB, 3-Leads, Vertical Mounting"
height 21
pads (3):
  rect 3.2x2 hole 1.2: 1(0,2.5)
  oval 3.2x2 hole 1.2: 2(0,0) 3(0,-2.5)
Top Overlay:
  circle w0.25: c0,4.5 r0.125
  rectangle: 2,-5 2.9,5
  lines w0.2: -1.5,-5 2.9,-5 2.9,5 -1.5,5
Top Courtyard:
  lines w0.025: -2.1,-5.5 3.4,-5.5 3.4,5.5 -2.1,5.5 -2.1,-5.5
Top Assembly:
  lines w0.05: -1.53,-2.69 -1.53,-2.737 -1.52,-2.737 ; -1.53,-0.067 -1.53,0.003 ; -1.53,0.026 -1.53,0.003 ; -1.53,0.459 -1.53,0.455 -1.52,0.455 ; -1.53,0.468 -1.52,0.468 ; -1.53,0.591 -1.53,0.686 ; -1.53,1.238 -1.53,1.343 ; -1.53,1.689 -1.53,1.783 ; -1.53,2.348 -1.53,2.442 ; -1.53,3.006 -1.53,3.02 -1.52,3.02 ; -1.52,-2.673 -1.53,-2.673 -1.53,-2.473 ; -1.52,-2.473 -1.53,-2.473 ; -1.52,-2.269 -1.53,-2.269 ; -1.52,-2.109 -1.53,-2.109 -1.53,-2.269 ; -1.52,-1.961 -1.53,-1.961 -1.53,-1.94 ; -1.52,-1.94 -1.53,-1.94 ; -1.52,-1.393 -1.53,-1.393 ; -1.52,-1.391 -1.53,-1.391 ; -1.52,-1.281 -1.53,-1.281 ; -1.52,-0.735 -1.53,-0.735 ; -1.52,-0.623 -1.53,-0.623 ; -1.52,-0.076 -1.53,-0.076 -1.53,-0.623 ; -1.52,0.003 -1.53,0.003 ; -1.52,0.035 -1.53,0.035 -1.53,0.363 -1.52,0.363 ; -1.52,0.473 -1.53,0.473 -1.53,0.583 -1.52,0.583 ; -1.52,0.694 -1.53,0.694 -1.53,1.241 -1.52,1.241 ; -1.52,1.352 -1.53,1.352 -1.53,1.68 -1.52,1.68 ; -1.52,1.792 -1.53,1.792 -1.53,1.901 ; -1.52,1.901 -1.53,1.901 ; -1.52,2.339 -1.53,2.339 -1.53,1.901 ; -1.52,2.45 -1.53,2.45 -1.53,2.997 -1.52,2.997 ; -1.52,3.109 -1.53,3.109 -1.53,3.656 -1.52,3.656 ; 1.657,-4.894 -1.064,-4.639 ; 1.657,4.902 -1.064,4.647 ; 1.674,-4.946 -1.067,-4.689 ; 1.674,4.953 -1.067,4.696 ; -1.53,-2.473 -1.53,-2.269 ; -1.53,-1.94 -1.53,-1.393 ; -1.53,-1.393 -1.53,-1.391 ; -1.53,-1.391 -1.53,-1.281 ; -1.53,-1.281 -1.53,-0.735 ; -1.53,-0.735 -1.53,-0.623 ; -1.52,-4.191 ccw(c-1.02,-4.191) -1.067,-4.689 ; -1.52,-4.191 -1.52,4.198 ; -1.52,-4.191 -1.472,-4.191 ; -1.52,4.198 cw(c-1.02,4.198) -1.067,4.696 ; -1.52,4.198 -1.472,4.198 ; -1.472,-4.191 ccw(c-1.022,-4.191) -1.064,-4.639 ; -1.472,-4.191 -1.472,4.198 ; -1.472,4.198 cw(c-1.022,4.198) -1.064,4.647 ; -1.067,-4.689 cw(c-0.688,-4.687) -1.064,-4.639 ; -1.067,4.696 ccw(c-0.688,4.694) -1.064,4.647 ; 1.657,-4.926 ccw(c1.677,-4.926) 1.677,-4.946 ; 1.657,-4.926 ccw(c1.676,-4.924) 1.677,-4.943 ; 1.657,-4.926 1.657,-3.436 ; 1.657,-3.436 ccw(c1.676,-3.434) 1.677,-3.452 ; 1.657,-3.436 1.657,3.443 ; 1.657,-3.436 1.677,-3.436 ; 1.657,3.443 cw(c1.676,3.441) 1.677,3.46 ; 1.657,3.443 1.657,4.934 ; 1.657,3.443 1.677,3.443 ; 1.657,4.934 cw(c1.677,4.934) 1.677,4.954 ; 1.657,4.934 cw(c1.676,4.932) 1.677,4.95 ; 1.677,-4.946 2.907,-4.946 ; 1.677,-4.946 1.677,-4.943 ; 1.677,-4.943 1.677,-3.452 ; 1.677,-4.943 2.907,-4.943 ; 1.677,-3.452 1.677,-3.436 ; 1.677,-3.452 2.907,-3.452 ; 1.677,-3.436 1.677,3.443 ; 1.677,-3.436 2.907,-3.436 ; 1.677,3.443 2.907,3.443 ; 1.677,3.443 1.677,3.46 ; 1.677,3.46 2.907,3.46 ; 1.677,3.46 1.677,4.95 ; 1.677,4.95 2.907,4.95 ; 1.677,4.95 1.677,4.954 ; 1.677,4.954 2.907,4.954 ; 2.907,-4.946 ccw(c2.907,-4.926) 2.927,-4.926 ; 2.907,-4.946 2.927,-4.946 2.927,-4.926 ; 2.907,-4.946 2.907,-4.943 ; 2.907,-4.943 ccw(c2.909,-4.924) 2.927,-4.926 ; 2.907,-4.943 2.907,-3.452 ; 2.907,-3.452 ccw(c2.909,-3.434) 2.927,-3.436 ; 2.907,-3.452 2.907,-3.436 ; 2.907,-3.436 2.907,3.443 ; 2.907,-3.436 2.927,-3.436 ; 2.907,3.443 2.907,3.46 ; 2.907,3.443 2.927,3.443 ; 2.907,3.46 cw(c2.909,3.441) 2.927,3.443 ; 2.907,3.46 2.907,4.95 ; 2.907,4.95 cw(c2.909,4.932) 2.927,4.934 ; 2.907,4.95 2.907,4.954 ; 2.907,4.954 cw(c2.907,4.934) 2.927,4.934 ; 2.907,4.954 2.927,4.954 2.927,4.934 ; 2.927,-4.926 2.927,-3.436 ; 2.927,-3.436 2.927,3.443 ; 2.927,3.443 2.927,4.934
  text ".Designator" at 0.679,-6.763 h3
3D body "TO-220AB(Vertical).x_t": height 21.37, standoff -3, extent -1.283,-5.083 2.908,5.083

## TO277A [mm] "TO277A, 3-Pads, Body 4.6x6.5mm (max)"
height 1.1
pads (4):
  round 0.025 smd paste-50 mask+0.05: 1(-0.9,0)
  round 0.025 smd paste+0 mask+0.05: 1(0,0)
  rect 1.4x1.4 smd paste+0 mask+0.05: 2(2.95,-1.05) 2(2.95,1.05)
Top Layer:
  region: -3.65,-1.45 -3.65,-1.46 -3.642,-1.478 -3.628,-1.492 -3.61,-1.5 -3.6,-1.5 -3.15,-1.5 -3.14,-1.501 -3.122,-1.508 -3.108,-1.522 -3.101,-1.54 -3.1,-1.55 -3.1,-2.15 -3.1,-2.16 -3.092,-2.178 -3.078,-2.192 -3.06,-2.2 -3.05,-2.2 0.2,-2.2 0.22,-2.202 0.256,-2.217 0.283,-2.244 0.298,-2.28 0.3,-2.3 0.3,-2.55 0.3,-2.56 0.308,-2.578 0.322,-2.592 0.34,-2.6 0.35,-2.6 1.7,-2.6 1.71,-2.6 1.728,-2.592 1.742,-2.578 1.75,-2.56 1.75,-2.55 1.75,2.55 1.75,2.56 1.742,2.578 1.728,2.592 1.71,2.6 1.7,2.6 0.35,2.6 0.34,2.6 0.322,2.592 0.308,2.578 0.3,2.56 0.3,2.55 0.3,2.3 0.298,2.28 0.283,2.244 0.256,2.217 0.22,2.202 0.2,2.2 -3.05,2.2 -3.06,2.2 -3.078,2.192 -3.092,2.178 -3.1,2.16 -3.1,2.15 -3.1,1.5 -3.101,1.49 -3.108,1.472 -3.122,1.458 -3.14,1.451 -3.15,1.45 -3.6,1.45 -3.61,1.45 -3.628,1.442 -3.642,1.428 -3.65,1.41 -3.65,1.4
Top Overlay:
  lines w0.2: -3.4,-1.85 -3.4,-2.45 -0.05,-2.45 ; -3.4,1.85 -3.4,2.45 -0.05,2.45 ; 2.1,-2.45 3.4,-2.45 3.4,-2.1 ; 2.1,2.45 3.4,2.45 3.4,2.1
Top Paste:
  region: -2.6,0.1 -2.6,0.9 -3.4,0.9 -3.4,0.1
  region: -2.6,-0.9 -2.6,-0.1 -3.4,-0.1 -3.4,-0.9
  region: -1.6,1.1 -1.6,1.9 -2.4,1.9 -2.4,1.1
  region: -1.6,0.1 -1.6,0.9 -2.4,0.9 -2.4,0.1
  region: -1.6,-0.9 -1.6,-0.1 -2.4,-0.1 -2.4,-0.9
  region: -1.6,-1.9 -1.6,-1.1 -2.4,-1.1 -2.4,-1.9
  region: -0.6,1.1 -0.6,1.9 -1.4,1.9 -1.4,1.1
  region: -0.6,0.1 -0.6,0.9 -1.4,0.9 -1.4,0.1
  region: -0.6,-0.9 -0.6,-0.1 -1.4,-0.1 -1.4,-0.9
  region: -0.6,-1.9 -0.6,-1.1 -1.4,-1.1 -1.4,-1.9
  region: -0.4,-0.1 -0.4,-0.9 0.4,-0.9 0.4,-0.1
  region: 0.4,-1.9 0.4,-1.1 -0.4,-1.1 -0.4,-1.9
  region: 1.4,-2.4 1.4,-1.6 0.6,-1.6 0.6,-2.4
  region: 1.4,-1.4 1.4,-0.6 0.6,-0.6 0.6,-1.4
  region: 1.4,-0.4 1.4,0.4 0.6,0.4 0.6,-0.4
  region: 0.6,2.4 0.6,1.6 1.4,1.6 1.4,2.4
  region: 1.4,1.4 0.6,1.4 0.6,0.6 1.4,0.6
  region: -0.4,1.9 -0.4,1.1 0.4,1.1 0.4,1.9
  region: 0.4,0.1 0.4,0.9 -0.4,0.9 -0.4,0.1
Top Courtyard:
  lines w0.025: -3.9,-1.75 -3.9,1.7 -3.45,1.7 -3.45,2.5 0.05,2.5 0.05,2.85 2,2.85 2,2.5 3.9,2.5 3.9,-2.5 2,-2.5 2,-2.85 0.05,-2.85 0.05,-2.5 -3.45,-2.5 -3.45,-1.75 -3.9,-1.75
Top Assembly:
  lines w0.05: -3.05,-1.025 -3.05,-2.001 ; -3.05,1.025 -3.05,2.001 ; 0.7,-2.15 -2.901,-2.15 ; 0.7,2.15 -2.901,2.15 ; 1.35,-2.15 2.901,-2.15 ; 1.35,2.15 2.901,2.15 ; 3.05,-1.65 3.05,-2.001 ; 3.05,-0.45 3.05,0.45 ; 3.05,1.65 3.05,2.001 ; -3.05,-2.001 ccw(c-2.901,-2.001) -2.901,-2.15 ; -3.05,-2.001 -2.94,-1.89 ; -3.05,2.001 cw(c-2.901,2.001) -2.901,2.15 ; -3.05,2.001 -2.94,1.89 ; -2.94,-1.89 ccw(c-2.791,-1.891) -2.79,-2.04 ; -2.94,-1.89 -2.94,1.89 ; -2.94,1.89 cw(c-2.791,1.891) -2.79,2.04 ; -2.901,-2.15 -2.79,-2.04 ; -2.901,2.15 -2.79,2.04 ; -2.79,-2.04 2.79,-2.04 ; -2.79,2.04 2.79,2.04 ; 2.79,-2.04 ccw(c2.791,-1.891) 2.94,-1.89 ; 2.79,-2.04 2.901,-2.15 ; 2.79,2.04 cw(c2.791,1.891) 2.94,1.89 ; 2.79,2.04 2.901,2.15 ; 2.901,-2.15 ccw(c2.901,-2.001) 3.05,-2.001 ; 2.901,2.15 cw(c2.901,2.001) 3.05,2.001 ; 2.94,-1.89 2.94,1.89 ; 2.94,-1.89 3.05,-2.001 ; 2.94,1.89 3.05,2.001 ; -3.25,-1.025 -3.024,-1.025 -3.024,1.025 -3.25,1.025 -3.25,-1.025 ; -2.79,-1.79 ccw(c-2.69,-1.79) -2.69,-1.89 2.69,-1.89 ccw(c2.69,-1.79) 2.79,-1.79 2.79,1.79 ccw(c2.69,1.79) 2.69,1.89 -2.69,1.89 ccw(c-2.69,1.79) -2.79,1.79 -2.79,-1.79 ; 0.7,-2.3 1.35,-2.3 1.35,-2.124 0.7,-2.124 0.7,-2.125 0.7,-2.3 ; 0.7,2.124 1.35,2.124 1.35,2.3 0.7,2.3 0.7,2.125 0.7,2.124 ; 3.024,-1.65 3.024,-0.45 3.25,-0.45 3.25,-1.65 3.024,-1.65 ; 3.024,0.45 3.024,1.65 3.25,1.65 3.25,0.45 3.024,0.45
  text ".Designator" at -6.763,-0.679 h3
3D body "TO-277A.x_t": height 1.11, standoff 0, extent -3.25,-2.3 3.25,2.3